# Altium footprint library PCB1.PcbLib: 53 footprints (part 2 of 4)
Each footprint in its own frame and in the unit in brackets; x right, y up, seen from the top. Pads: shape width x height; smd on the part's side, far side on the other; paste and mask are expansions set on the pad; w line width, h text height; cw(c..) or ccw(c..) is an arc to the next point about the centre after c.
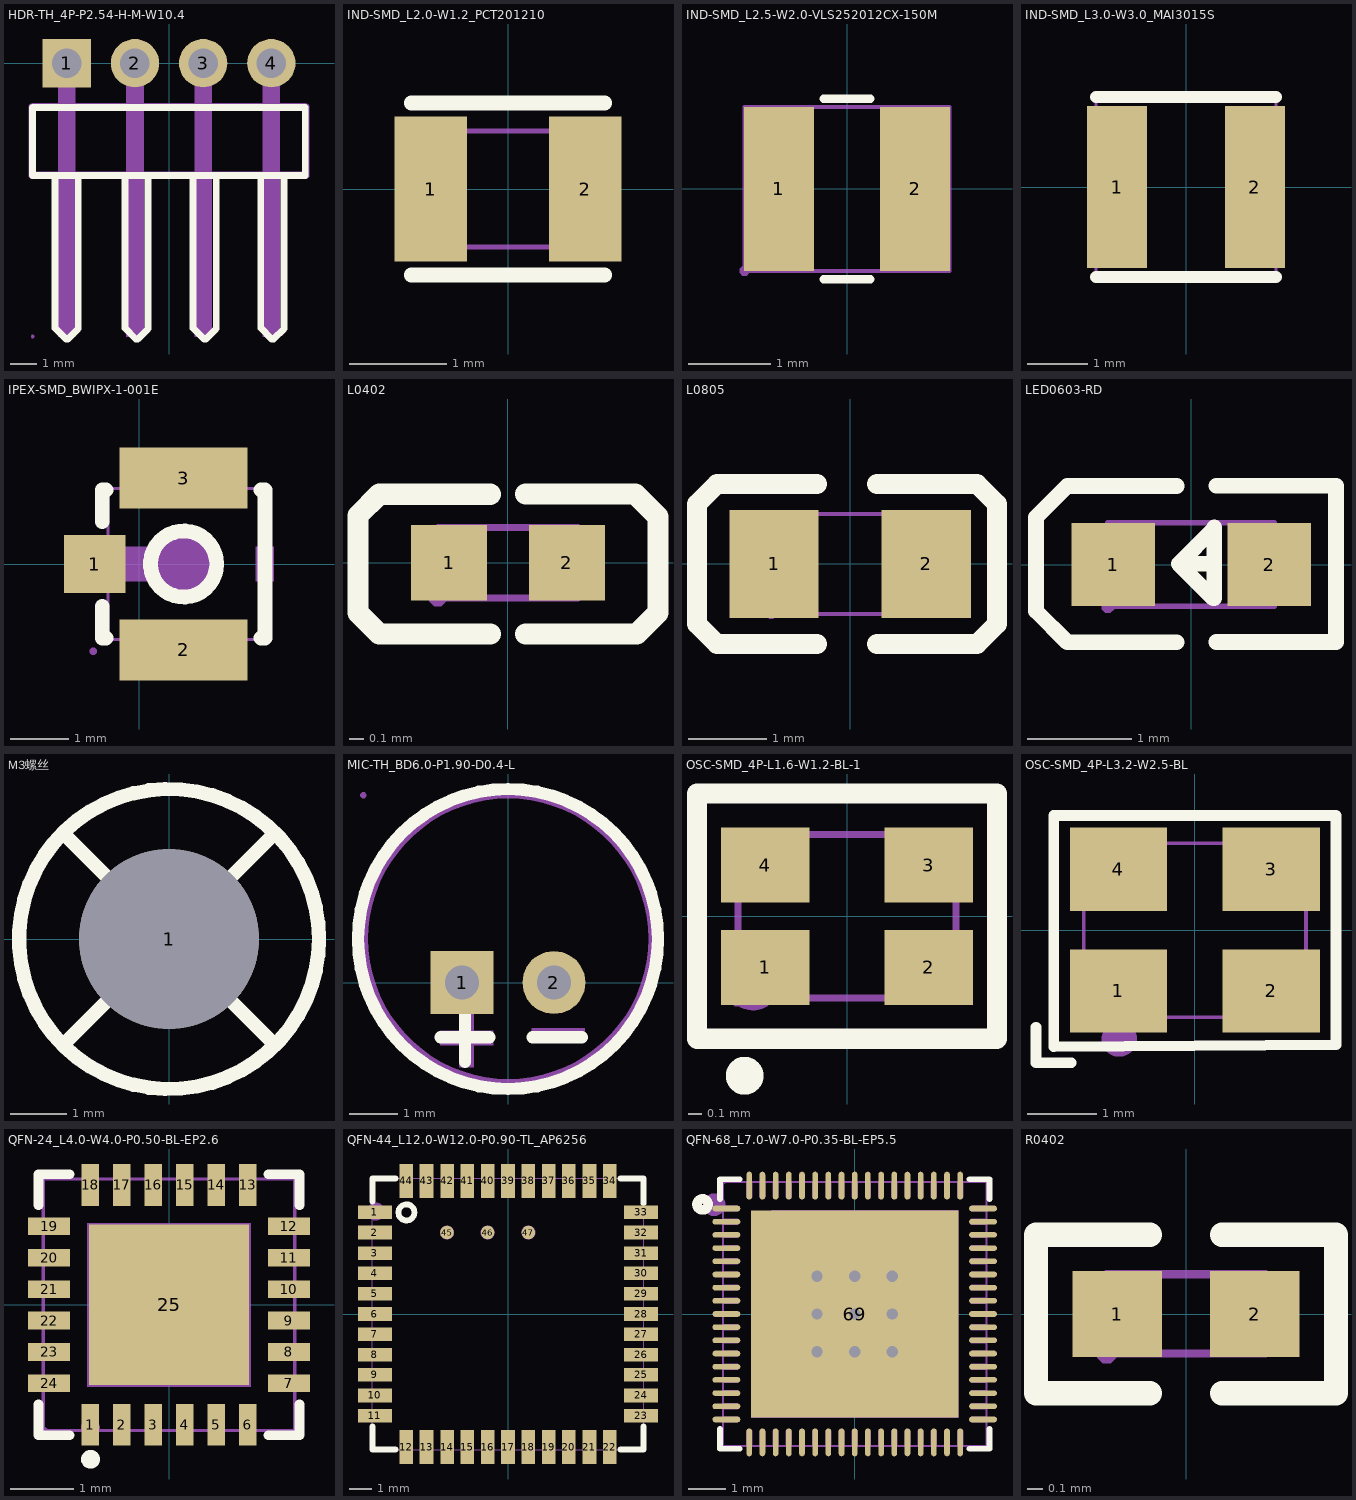
[diagram p1: the footprints below, top view; thin cyan lines are the x and y axes]

## HDR-TH_4P-P2.54-H-M-W10.4 [mm]
pads (4):
  rect 1.8x1.8 hole 1.1: 1(-3.81,0)
  round 1.8 hole 1.1: 2(-1.27,0) 3(1.27,0) 4(3.81,0)
Top Overlay:
  lines w0.254: -5.09,-1.699 -5.09,-4.181 5.07,-4.181 5.07,-1.651 -5.09,-1.651 ; -3.84,-10.273 -4.244,-9.869 ; -3.764,-10.273 -3.383,-9.892 ; -1.644,-4.273 -1.644,-9.869 -1.24,-10.273 ; -1.164,-10.273 -0.783,-9.892 -0.783,-4.273 ; 1.299,-10.273 0.895,-9.869 ; 1.375,-10.273 1.756,-9.892 ; 3.417,-4.273 3.417,-9.869 3.821,-10.273 ; 3.897,-10.273 4.278,-9.892 4.278,-4.273 ; -4.244,-9.869 -4.244,-4.273 -4.244,-9.869 ; -3.383,-9.892 -3.383,-4.273 -3.383,-9.892 ; 0.895,-9.869 0.895,-4.273 0.895,-9.869 ; 1.756,-9.892 1.756,-4.273 1.756,-9.892
Mechanical 6:
  region: 4.969,-4.177 4.969,-1.754 -5.104,-1.754 -5.152,-1.744 -5.193,-1.717 -5.221,-1.676 -5.231,-1.627 -5.221,-1.578 -5.193,-1.537 -5.152,-1.51 -5.104,-1.5 5.096,-1.5 5.145,-1.51 5.186,-1.537 5.214,-1.578 5.223,-1.627 5.223,-4.177 5.214,-4.226 5.186,-4.267 5.145,-4.294 5.096,-4.304 5.048,-4.294 5.007,-4.267 4.979,-4.226
  region: -4.973,-1.63 -4.973,-4.053 5.1,-4.053 5.149,-4.063 5.19,-4.09 5.217,-4.131 5.227,-4.18 5.217,-4.229 5.19,-4.27 5.149,-4.297 5.1,-4.307 -5.1,-4.307 -5.149,-4.297 -5.19,-4.27 -5.217,-4.229 -5.227,-4.18 -5.227,-1.63 -5.217,-1.581 -5.19,-1.54 -5.149,-1.513 -5.1,-1.503 -5.051,-1.513 -5.01,-1.54 -4.983,-1.581
Mechanical 7:
  lines w0.051: -5.08,-4.18 -5.08,-1.64 5.08,-1.64 5.08,-4.18 -5.08,-4.18
Mechanical 8:
  region: -5.02,-10.18 -5.02,-10.205 -5.055,-10.24 -5.105,-10.24 -5.14,-10.205 -5.14,-10.18 -5.14,-10.155 -5.105,-10.12 -5.055,-10.12 -5.02,-10.155 -5.02,-10.18
Mechanical 9:
  region: 3.49,0.32 4.13,0.32 4.13,-0.32 3.49,-0.32
  region: 0.95,0.32 1.59,0.32 1.59,-0.32 0.95,-0.32
  region: -1.59,0.32 -0.95,0.32 -0.95,-0.32 -1.59,-0.32
  region: -4.13,0.32 -3.49,0.32 -3.49,-0.32 -4.13,-0.32
Mechanical 10:
  region: -4.13,0.32 -4.13,-10.18 -3.49,-10.18 -3.49,0.32
  region: -1.59,0.32 -1.59,-10.18 -0.95,-10.18 -0.95,0.32
  region: 0.95,0.32 0.95,-10.18 1.59,-10.18 1.59,0.32
  region: 3.49,0.32 3.49,-10.18 4.13,-10.18 4.13,0.32
3D body "C492412.step": height 2.5, standoff -3.05, extent -5.08,-10.219 5.09,0.381

## IND-SMD_L2.0-W1.2_PCT201210 [mm]
pads (2):
  rect 0.75x1.5 smd: 1(-0.8,0) 2(0.8,0)
Top Overlay:
  lines w0.154: -1,-0.889 1,-0.889 ; -1,0.889 1,0.889
Mechanical 7:
  lines w0.051: -1,-0.6 -1,0.6 1,0.6 1,-0.6 -1,-0.6
Mechanical 8:
  region: -0.94,-0.6 -0.94,-0.625 -0.975,-0.66 -1.025,-0.66 -1.06,-0.625 -1.06,-0.6 -1.06,-0.575 -1.025,-0.54 -0.975,-0.54 -0.94,-0.575 -0.94,-0.6
Mechanical 9:
  region: 0.6,0.6 1,0.6 1,-0.6 0.6,-0.6
  region: -1,0.6 -0.6,0.6 -0.6,-0.6 -1,-0.6
3D body "C2831365.step": height 0.61, standoff 0, extent -1.003,-0.665 0.997,0.636

## IND-SMD_L2.5-W2.0-VLS252012CX-150M [mm]
pads (2):
  rect 0.85x2 smd: 1(-0.83,0) 2(0.83,0)
Top Overlay:
  lines w0.102: -0.288,-1.1 0.287,-1.1 ; -0.288,1.1 0.287,1.1
Mechanical 7:
  lines w0.051: -1.25,-1 -1.25,1 1.25,1 1.25,-1 -1.25,-1
Mechanical 8:
  region: -1.19,-1 -1.19,-1.025 -1.225,-1.06 -1.275,-1.06 -1.31,-1.025 -1.31,-1 -1.31,-0.975 -1.275,-0.94 -1.225,-0.94 -1.19,-0.975 -1.19,-1
Mechanical 9:
  region: -1.23,1 -0.43,1 -0.43,-1 -1.23,-1
  region: 0.43,1 1.23,1 1.23,-1 0.43,-1
3D body "C5832360.step": height 1.12, standoff -0.09, extent -1.251,-1.001 1.251,1.001

## IND-SMD_L3.0-W3.0_MAI3015S [mm]
pads (2):
  rect 1x2.7 smd: 1(-1.15,0) 2(1.15,0)
Top Overlay:
  lines w0.2: -1.5,-1.5 1.5,-1.5 ; -1.5,1.5 1.5,1.5
Mechanical 7:
  lines w0.051: -1.5,-1.5 1.5,-1.5 1.5,1.5 -1.5,1.5 -1.5,-1.5
Mechanical 8:
  region: -1.44,-1.5 -1.44,-1.525 -1.475,-1.56 -1.525,-1.56 -1.56,-1.525 -1.56,-1.5 -1.56,-1.475 -1.525,-1.44 -1.475,-1.44 -1.44,-1.475 -1.44,-1.5
Mechanical 9:
  region: -1.5,1.25 -0.7,1.25 -0.7,-1.25 -1.5,-1.25
  region: 0.7,1.25 1.5,1.25 1.5,-1.25 0.7,-1.25
3D body "C55381747.step": height 1.56, standoff 0, extent -1.5,-1.5 1.5,1.5

## IPEX-SMD_BWIPX-1-001E [mm]
pads (3):
  rect 1.05x1 smd: 1(-0.763,0)
  rect 2.2x1.05 smd: 2(0.763,-1.475) 3(0.763,1.475)
Top Overlay:
  circle w0.254: c0.763,0 r0.568
  lines w0.254: -0.635,-0.731 -0.635,-1.27 -0.569,-1.27 ; -0.635,0.731 -0.635,1.27 -0.569,1.27 ; 2.094,-1.27 2.16,-1.27 2.16,-0.731 2.16,0.731 2.16,1.27 2.094,1.27
Mechanical 6:
  circle w0.2: c-1.015,0 r0.1
  region: 1.293,0 1.284,-0.099 1.255,-0.194 1.208,-0.282 1.145,-0.359 1.068,-0.422 0.98,-0.469 0.884,-0.498 0.785,-0.508 0.693,-0.498 0.603,-0.47 0.521,-0.427 0.447,-0.37 0.385,-0.3 -0.45,-0.3 -0.45,0.3 0.385,0.3 0.447,0.37 0.521,0.427 0.603,0.47 0.693,0.498 0.785,0.508 0.884,0.498 0.98,0.469 1.068,0.422 1.145,0.359 1.208,0.282 1.255,0.194 1.284,0.099
Mechanical 7:
  lines w0.051: -0.537,-1.3 -0.537,1.3 2.063,1.3 2.063,-1.3 -0.537,-1.3
Mechanical 8:
  region: -0.727,-1.5 -0.727,-1.525 -0.763,-1.56 -0.812,-1.56 -0.847,-1.525 -0.847,-1.5 -0.847,-1.475 -0.812,-1.44 -0.763,-1.44 -0.727,-1.475 -0.727,-1.5
Mechanical 9:
  region: -0.437,0.3 -0.437,-0.3 -0.787,-0.3 -0.787,0.3
  region: 1.663,-1.5 -0.137,-1.5 -0.137,-1.1 1.663,-1.1
  region: 1.663,1.1 -0.137,1.1 -0.137,1.5 1.663,1.5
Mechanical 10:
  region: 1.293,0 1.284,-0.099 1.255,-0.194 1.208,-0.282 1.145,-0.359 1.068,-0.422 0.98,-0.469 0.884,-0.498 0.785,-0.508 0.693,-0.498 0.603,-0.47 0.521,-0.427 0.447,-0.37 0.385,-0.3 -0.45,-0.3 -0.45,0.3 0.385,0.3 0.447,0.37 0.521,0.427 0.603,0.47 0.693,0.498 0.785,0.508 0.884,0.498 0.98,0.469 1.068,0.422 1.145,0.359 1.208,0.282 1.255,0.194 1.284,0.099
  region: 2,0.3 2.312,0.3 2.312,-0.3 2,-0.3
3D body "C496552.step": height 1.25, standoff -0.01, extent -0.788,-1.5 2.312,1.5

## L0402 [mm]
pads (2):
  rect 0.54x0.54 smd: 1(-0.42,0) 2(0.42,0)
Top Overlay:
  lines w0.152: -0.127,-0.508 -0.917,-0.508 -1.069,-0.356 -1.069,0.337 -0.917,0.489 -0.127,0.489 ; 0.127,-0.508 0.917,-0.508 1.069,-0.356 1.069,0.328 0.907,0.49 0.127,0.49
Mechanical 7:
  lines w0.051: -0.5,-0.25 0.5,-0.25 0.5,0.25 -0.5,0.25 -0.5,-0.25
Mechanical 8:
  region: -0.44,-0.25 -0.44,-0.275 -0.475,-0.31 -0.525,-0.31 -0.56,-0.275 -0.56,-0.25 -0.56,-0.225 -0.525,-0.19 -0.475,-0.19 -0.44,-0.225 -0.44,-0.25
Mechanical 9:
  region: 0.5,-0.25 0.5,0.25 0.25,0.25 0.25,-0.25
  region: -0.5,-0.25 -0.5,0.25 -0.25,0.25 -0.25,-0.25
3D body "C76891.step": height 0.25, standoff -0.25, extent -0.5,-0.25 0.5,0.25

## L0805 [mm]
pads (2):
  rect 1.133x1.377 smd paste-100 mask+0.051: 1(-0.966,0) 2(0.966,0)
Top Overlay:
  lines w0.254: -0.421,-1.016 -1.691,-1.016 -1.945,-0.762 -1.945,-0.635 -1.945,0.762 -1.691,1.016 -1.564,1.016 -0.421,1.016 ; 0.341,-1.016 1.484,-1.016 1.611,-1.016 1.865,-0.762 1.865,0.635 1.865,0.762 1.611,1.016 0.341,1.016
Top Paste:
  region: -0.36,-0.22 -0.36,0.22 -0.745,0.689 -1.433,0.689 -1.533,0.589 -1.533,-0.588 -1.433,-0.688 -0.745,-0.688
  region: 0.36,-0.22 0.36,0.22 0.745,0.689 1.433,0.689 1.533,0.589 1.533,-0.588 1.433,-0.688 0.745,-0.688
Mechanical 7:
  lines w0.051: -1,-0.637 -1,0.638 1,0.638 1,-0.637 -1,-0.637
Mechanical 8:
  region: -0.94,-0.637 -0.94,-0.662 -0.975,-0.697 -1.025,-0.697 -1.06,-0.662 -1.06,-0.637 -1.06,-0.613 -1.025,-0.577 -0.975,-0.577 -0.94,-0.613 -0.94,-0.637
Mechanical 9:
  region: 1,-0.637 1,0.638 0.6,0.638 0.6,-0.637
  region: -1,-0.637 -1,0.638 -0.6,0.638 -0.6,-0.637
3D body "C63166.step": height 0.61, standoff 0, extent -1,-0.651 1,0.65

## LED0603-RD [mm]
pads (2):
  rect 0.8x0.8 smd: 1(-0.749,0) 2(0.749,0)
Top Overlay:
  lines w0.15: -0.14,-0.746 -1.19,-0.746 -1.49,-0.446 -1.49,-0.346 -1.49,0.354 -1.49,0.454 -1.19,0.754 -0.14,0.754 ; 0.22,0.007 -0.12,0.007 ; 0.24,-0.744 1.39,-0.744 ; 0.24,0.757 1.39,0.757 1.39,-0.723 ; -0.12,0.007 0.21,-0.324 0.22,-0.324 0.22,0.357 0.22,0.347 -0.12,0.007
Mechanical 6:
  region: -1.07,0.062 -0.53,0.062 -0.53,-0.068 -1.07,-0.068
  region: 0.735,-0.267 0.735,0.273 0.865,0.273 0.865,-0.267
  region: 0.529,0.068 1.069,0.068 1.069,-0.062 0.529,-0.062
Mechanical 7:
  lines w0.051: -0.8,-0.4 -0.8,0.4 0.8,0.4 0.8,-0.4 -0.8,-0.4
Mechanical 8:
  region: -0.739,-0.403 -0.739,-0.428 -0.775,-0.463 -0.824,-0.463 -0.859,-0.428 -0.859,-0.403 -0.859,-0.379 -0.824,-0.344 -0.775,-0.344 -0.739,-0.379 -0.739,-0.403
Mechanical 9:
  region: -0.8,-0.403 -0.8,0.397 -0.5,0.397 -0.5,-0.403
  region: 0.5,-0.396 0.5,0.404 0.8,0.404 0.8,-0.396
3D body "C51933293.step": height 0.55, standoff -0.01, extent -0.81,-0.41 0.81,0.41

## M3螺丝 [mil]
pads (1):
  round 126 hole 126 paste-99999 mask+4: 1(0,0)
Top Overlay:
  circle w10: c0,0 r105
  lines w10: -72.5,-72.5 72.5,72.5 ; -72.5,72.5 72.5,-72.5

## MIC-TH_BD6.0-P1.90-D0.4-L [mm]
pads (2):
  rect 1.3x1.3 hole 0.7: 1(-0.95,0)
  round 1.3 hole 0.7: 2(0.95,0)
Top Overlay:
  circle w0.254: c0,0.9 r3.1
  lines w0.254: -1.397,-1.132 -0.381,-1.132 ; -0.889,-1.64 -0.889,-0.624 ; 0.508,-1.132 1.524,-1.132
Mechanical 6:
  drawing of 7 lines, arcs and shapes, not listed
Mechanical 7:
  lines w0.051: -2.99,0.82 ccw(c-0.165,0.82) -2.163,-1.177 -2.105,-1.235 -1.9,-1.425 -1.645,-1.605 -1.415,-1.745 -1.145,-1.87 -0.87,-1.97 -0.59,-2.04 -0.29,-2.09 0.29,-2.09 0.865,-1.975 1.4,-1.75 1.95,-1.4 2.187,-1.163 ccw(c0.224,0.8) 3,0.8 3,1.019 ccw(c0.269,1.019) 2.2,2.95 2.134,3.016 ccw(c0,0.882) 0,3.9 -0.29,3.89 -0.89,3.77 -1.15,3.67 -1.42,3.545 -1.63,3.415 -1.92,3.205 -2.27,2.855 -2.485,2.575 -2.65,2.31 -2.775,2.04 -2.875,1.755 -2.99,1.2 -2.99,0.82
Mechanical 8:
  region: -2.93,3.87 -2.93,3.845 -2.965,3.81 -3.015,3.81 -3.05,3.845 -3.05,3.87 -3.05,3.895 -3.015,3.93 -2.965,3.93 -2.93,3.895 -2.93,3.87
Mechanical 9:
  region: -0.7,0 -0.7,-0.05 -0.738,-0.142 -0.808,-0.212 -0.9,-0.25 -1,-0.25 -1.092,-0.212 -1.162,-0.142 -1.2,-0.05 -1.2,0 -1.2,0.05 -1.162,0.142 -1.092,0.212 -1,0.25 -0.9,0.25 -0.808,0.212 -0.738,0.142 -0.7,0.05 -0.7,0
  region: 1.2,0 1.2,-0.05 1.162,-0.142 1.092,-0.212 1,-0.25 0.9,-0.25 0.808,-0.212 0.738,-0.142 0.7,-0.05 0.7,0 0.7,0.05 0.738,0.142 0.808,0.212 0.9,0.25 1,0.25 1.092,0.212 1.162,0.142 1.2,0.05 1.2,0
3D body "C233905.step": height 2.85, standoff -2.8, extent -3,-2.111 3,3.899

## OSC-SMD_4P-L1.6-W1.2-BL-1 [mm]
pads (4):
  rect 0.65x0.55 smd: 1(-0.6,-0.375) 2(0.6,-0.375) 3(0.6,0.375) 4(-0.6,0.375)
Top Overlay:
  circle w0.15: c-0.75,-1.17 r0.064
  lines w0.15: -1.1,-0.9 1.1,-0.9 1.1,0.9 -1.1,0.9 -1.1,-0.9
Mechanical 6:
  circle w0.2: c-0.69,-0.49 r0.1
Mechanical 7:
  lines w0.051: -0.8,-0.6 -0.8,0.6 0.8,0.6 0.8,-0.6 -0.8,-0.6
Mechanical 8:
  region: -0.74,-0.6 -0.74,-0.625 -0.775,-0.66 -0.825,-0.66 -0.86,-0.625 -0.86,-0.6 -0.86,-0.575 -0.825,-0.54 -0.775,-0.54 -0.74,-0.575 -0.74,-0.6
Mechanical 9:
  region: -0.787,-0.2 -0.412,-0.2 -0.412,-0.55 -0.787,-0.55
  region: -0.75,0.2 -0.75,0.55 -0.45,0.55 -0.45,0.2
  region: 0.45,0.2 0.45,0.55 0.75,0.55 0.75,0.2
  region: 0.45,-0.55 0.45,-0.2 0.75,-0.2 0.75,-0.55
3D body "C20623632.step": height 0.8, standoff -0.01, extent -0.8,-0.6 0.8,0.6

## OSC-SMD_4P-L3.2-W2.5-BL [mm]
pads (4):
  rect 1.4x1.2 smd: 1(-1.1,-0.875) 2(1.1,-0.875) 3(1.1,0.875) 4(-1.1,0.875)
Top Overlay:
  lines w0.152: -2.286,-1.397 -2.286,-1.905 -1.778,-1.905 ; -2.029,-1.679 -2.029,1.651 2.032,1.651 2.032,0 2.032,-1.651 -2.029,-1.679
Mechanical 6:
  circle w0.254: c-1.088,-1.567 r0.127
  region: -1.486,-0.428 -1.45,-0.428 -1.45,-1.004 -1.486,-1.004
  region: -1.522,-0.428 -1.486,-0.428 -1.486,-1.004 -1.522,-1.004
  region: -1.558,-0.428 -1.522,-0.428 -1.522,-1.004 -1.558,-1.004
  region: -1.594,-0.464 -1.558,-0.464 -1.558,-1.004 -1.594,-1.004
  region: -1.63,-0.464 -1.594,-0.464 -1.594,-0.572 -1.63,-0.572
  region: -1.666,-0.5 -1.63,-0.5 -1.63,-0.608 -1.666,-0.608
  region: -1.702,-0.536 -1.666,-0.536 -1.666,-0.608 -1.702,-0.608
  region: -1.738,-0.536 -1.702,-0.536 -1.702,-0.608 -1.738,-0.608
Mechanical 7:
  lines w0.051: -1.6,-1.25 -1.6,1.25 1.6,1.25 1.6,-1.25 -1.6,-1.25
Mechanical 8:
  region: -1.54,-1.25 -1.54,-1.275 -1.575,-1.31 -1.625,-1.31 -1.66,-1.275 -1.66,-1.25 -1.66,-1.225 -1.625,-1.19 -1.575,-1.19 -1.54,-1.225 -1.54,-1.25
Mechanical 9:
  region: 0.6,1.249 1.5,1.249 1.5,0.449 0.6,0.449
  region: -1.5,1.249 -0.6,1.249 -0.6,0.449 -1.5,0.449
  region: -1.5,-0.449 -0.6,-0.449 -0.6,-1.249 -1.5,-1.249
  region: 0.6,-0.449 1.5,-0.449 1.5,-1.249 0.6,-1.249
3D body "C5444545.step": height 0.7, standoff 0, extent -1.6,-1.25 1.6,1.25

## QFN-24_L4.0-W4.0-P0.50-BL-EP2.6 [mm]
pads (25):
  rect 0.28x0.665 smd paste-100 mask+0.05: 1(-1.25,-1.908) 2(-0.75,-1.908) 3(-0.25,-1.908) 4(0.25,-1.908) 5(0.75,-1.908) 6(1.25,-1.908) 13(1.25,1.908) 14(0.75,1.908) 15(0.25,1.908) 16(-0.25,1.908) 17(-0.75,1.908) 18(-1.25,1.908)
  rect 0.665x0.28 smd paste-100 mask+0.05: 7(1.908,-1.25) 8(1.908,-0.75) 9(1.908,-0.25) 10(1.908,0.25) 11(1.908,0.75) 12(1.908,1.25) 19(-1.908,1.25) 20(-1.908,0.75) 21(-1.908,0.25) 22(-1.908,-0.25) 23(-1.908,-0.75) 24(-1.908,-1.25)
  rect 2.55x2.55 smd paste-100 mask+0.05: 25(0,0)
Top Overlay:
  circle w0.15: c-1.25,-2.458 r0.075
  lines w0.152: -2.076,-1.58 -2.076,-2.076 -1.58,-2.076 ; -2.076,1.58 -2.076,2.076 -1.58,2.076 ; 1.58,-2.076 2.076,-2.076 2.076,-1.58 ; 1.58,2.076 2.076,2.076 2.076,1.58
Top Paste:
  region: -1.575,-1.39 -1.575,-1.11 -2.24,-1.11 -2.24,-1.39
  region: -1.575,-0.89 -1.575,-0.61 -2.24,-0.61 -2.24,-0.89
  region: -1.575,-0.39 -1.575,-0.11 -2.24,-0.11 -2.24,-0.39
  region: -1.575,0.11 -1.575,0.39 -2.24,0.39 -2.24,0.11
  region: -1.575,0.61 -1.575,0.89 -2.24,0.89 -2.24,0.61
  region: -1.575,1.11 -1.575,1.39 -2.24,1.39 -2.24,1.11
  region: -1.39,2.24 -1.39,1.575 -1.11,1.575 -1.11,2.24
  region: -0.89,2.24 -0.89,1.575 -0.61,1.575 -0.61,2.24
  region: -0.39,2.24 -0.39,1.575 -0.11,1.575 -0.11,2.24
  region: 0.11,2.24 0.11,1.575 0.39,1.575 0.39,2.24
  region: 0.61,2.24 0.61,1.575 0.89,1.575 0.89,2.24
  region: 1.11,2.24 1.11,1.575 1.39,1.575 1.39,2.24
  region: 2.24,1.11 2.24,1.39 1.575,1.39 1.575,1.11
  region: 2.24,0.61 2.24,0.89 1.575,0.89 1.575,0.61
  region: 2.24,0.11 2.24,0.39 1.575,0.39 1.575,0.11
  region: 2.24,-0.39 2.24,-0.11 1.575,-0.11 1.575,-0.39
  region: 2.24,-0.89 2.24,-0.61 1.575,-0.61 1.575,-0.89
  region: 2.24,-1.39 2.24,-1.11 1.575,-1.11 1.575,-1.39
  region: 1.11,-2.24 1.11,-1.575 1.39,-1.575 1.39,-2.24
  region: 0.61,-2.24 0.61,-1.575 0.89,-1.575 0.89,-2.24
  region: 0.11,-2.24 0.11,-1.575 0.39,-1.575 0.39,-2.24
  region: -0.39,-2.24 -0.39,-1.575 -0.11,-1.575 -0.11,-2.24
  region: -0.89,-2.24 -0.89,-1.575 -0.61,-1.575 -0.61,-2.24
  region: -1.39,-2.24 -1.39,-1.575 -1.11,-1.575 -1.11,-2.24
  region: -1.02,1.02 1.02,1.02 1.02,-1.02 -1.02,-1.02
Mechanical 6:
  circle w0.15: c-1.25,-1.958 r0.075
Mechanical 7:
  lines w0.051: -2,-2 -2,2 2,2 2,-2 -2,-2
Mechanical 8:
  region: -1.94,-2 -1.94,-2.025 -1.975,-2.06 -2.025,-2.06 -2.06,-2.025 -2.06,-2 -2.06,-1.975 -2.025,-1.94 -1.975,-1.94 -1.94,-1.975 -1.94,-2
Mechanical 9:
  region: -1.37,-2 -1.37,-1.6 -1.13,-1.6 -1.13,-2
  region: -0.87,-2 -0.87,-1.6 -0.63,-1.6 -0.63,-2
  region: -0.37,-2 -0.37,-1.6 -0.13,-1.6 -0.13,-2
  region: 0.13,-2 0.13,-1.6 0.37,-1.6 0.37,-2
  region: 0.63,-2 0.63,-1.6 0.87,-1.6 0.87,-2
  region: 1.13,-2 1.13,-1.6 1.37,-1.6 1.37,-2
  region: 1.6,-1.37 1.6,-1.13 2,-1.13 2,-1.37
  region: 1.6,-0.87 1.6,-0.63 2,-0.63 2,-0.87
  region: 1.6,-0.37 1.6,-0.13 2,-0.13 2,-0.37
  region: 1.6,0.13 1.6,0.37 2,0.37 2,0.13
  region: 1.6,0.63 1.6,0.87 2,0.87 2,0.63
  region: 1.6,1.13 1.6,1.37 2,1.37 2,1.13
  region: 1.13,2 1.13,1.6 1.37,1.6 1.37,2
  region: 0.63,2 0.63,1.6 0.87,1.6 0.87,2
  region: 0.13,2 0.13,1.6 0.37,1.6 0.37,2
  region: -0.37,2 -0.37,1.6 -0.13,1.6 -0.13,2
  region: -0.87,2 -0.87,1.6 -0.63,1.6 -0.63,2
  region: -1.37,2 -1.37,1.6 -1.13,1.6 -1.13,2
  region: -1.6,1.13 -1.6,1.37 -2,1.37 -2,1.13
  region: -1.6,0.63 -1.6,0.87 -2,0.87 -2,0.63
  region: -1.6,0.13 -1.6,0.37 -2,0.37 -2,0.13
  region: -1.6,-0.37 -1.6,-0.13 -2,-0.13 -2,-0.37
  region: -1.6,-0.87 -1.6,-0.63 -2,-0.63 -2,-0.87
  region: -1.6,-1.37 -1.6,-1.13 -2,-1.13 -2,-1.37
  region: -1.3,1.3 1.3,1.3 1.3,-1.3 -1.3,-1.3
3D body "C511283.step": height 0.91, standoff 0, extent -2,-2 2,2

## QFN-44_L12.0-W12.0-P0.90-TL_AP6256 [mm]
pads (47):
  rect 1.5x0.6 smd paste+0 mask+0.05: 1(-5.889,4.496) 2(-5.889,3.607) 3(-5.889,2.692) 4(-5.889,1.803) 5(-5.889,0.889) 6(-5.889,0) 7(-5.889,-0.889) 8(-5.889,-1.803) 9(-5.889,-2.692) 10(-5.889,-3.607) 11(-5.889,-4.496) 23(5.889,-4.496) 24(5.889,-3.607) 25(5.889,-2.692) 26(5.889,-1.803) 27(5.889,-0.889) 28(5.889,0) 29(5.889,0.889) 30(5.889,1.803) 31(5.889,2.692) 32(5.889,3.607) 33(5.889,4.496)
  rect 0.6x1.5 smd paste+0 mask+0.05: 12(-4.496,-5.889) 13(-3.607,-5.889) 14(-2.692,-5.889) 15(-1.803,-5.889) 16(-0.889,-5.889) 17(0,-5.889) 18(0.889,-5.889) 19(1.803,-5.889) 20(2.692,-5.889) 21(3.607,-5.889) 22(4.496,-5.889) 34(4.496,5.889) 35(3.607,5.889) 36(2.692,5.889) 37(1.803,5.889) 38(0.889,5.889) 39(0,5.889) 40(-0.889,5.889) 41(-1.803,5.889) 42(-2.692,5.889) 43(-3.607,5.889) 44(-4.496,5.889)
  round 0.6 smd paste+0 mask+0.05: 45(-2.7,3.607) 46(-0.9,3.607) 47(0.9,3.607)
Top Overlay:
  circle w0.254: c-4.496,4.496 r0.356
  lines w0.254: -5.994,-4.978 -5.994,-5.994 -4.978,-5.994 ; -5.994,4.978 -5.994,5.994 -4.978,5.994 ; 4.978,-5.994 5.994,-5.994 5.994,-4.978 ; 4.978,5.994 5.994,5.994 5.994,4.902
Mechanical 6:
  circle w0.4: c-5.86,4.536 r0.2
Mechanical 7:
  lines w0.051: -6,-6 6,-6 6,6 -6,6 -6,-6
Mechanical 8:
  region: -5.94,6 -5.94,5.975 -5.975,5.94 -6.025,5.94 -6.06,5.975 -6.06,6 -6.06,6.025 -6.025,6.06 -5.975,6.06 -5.94,6.025 -5.94,6
Mechanical 9:
  drawing of 47 lines, arcs and shapes, not listed
3D body "C5248079.step": height 1.5, standoff -0.01, extent -6.01,-6.01 6.01,6.01

## QFN-68_L7.0-W7.0-P0.35-BL-EP5.5 [mm]
pads (69):
  oval 0.74x0.15 smd paste-100 mask+0.051: 1(-3.407,2.8) 2(-3.407,2.45) 3(-3.407,2.1) 4(-3.407,1.75) 5(-3.407,1.4) 6(-3.407,1.05) 7(-3.407,0.7) 8(-3.407,0.35) 9(-3.407,0) 10(-3.407,-0.35) 11(-3.407,-0.7) 12(-3.407,-1.05) 13(-3.407,-1.4) 14(-3.407,-1.75) 15(-3.407,-2.1) 16(-3.407,-2.45) 17(-3.407,-2.8) 35(3.407,-2.8) 36(3.407,-2.45) 37(3.407,-2.1) 38(3.407,-1.75) 39(3.407,-1.4) 40(3.407,-1.05) 41(3.407,-0.7) 42(3.407,-0.35) 43(3.407,0) 44(3.407,0.35) 45(3.407,0.7) 46(3.407,1.05) 47(3.407,1.4) 48(3.407,1.75) 49(3.407,2.1) 50(3.407,2.45) 51(3.407,2.8)
  oval 0.15x0.74 smd paste-100 mask+0.051: 18(-2.8,-3.407) 19(-2.45,-3.407) 20(-2.1,-3.407) 21(-1.75,-3.407) 22(-1.4,-3.407) 23(-1.05,-3.407) 24(-0.7,-3.407) 25(-0.35,-3.407) 26(0,-3.407) 27(0.35,-3.407) 28(0.7,-3.407) 29(1.05,-3.407) 30(1.4,-3.407) 31(1.75,-3.407) 32(2.1,-3.407) 33(2.45,-3.407) 34(2.8,-3.407) 52(2.8,3.407) 53(2.45,3.407) 54(2.1,3.407) 55(1.75,3.407) 56(1.4,3.407) 57(1.05,3.407) 58(0.7,3.407) 59(0.35,3.407) 60(0,3.407) 61(-0.35,3.407) 62(-0.7,3.407) 63(-1.05,3.407) 64(-1.4,3.407) 65(-1.75,3.407) 66(-2.1,3.407) 67(-2.45,3.407) 68(-2.8,3.407)
  rect 5.5x5.5 smd paste-100 mask+0.051: 69(0,0)
via -1,1 diameter 0.6 hole 0.3
via 0,1 diameter 0.6 hole 0.3
via 1,1 diameter 0.6 hole 0.3
via -1,0 diameter 0.6 hole 0.3
via 0,0 diameter 0.6 hole 0.3
via 1,0 diameter 0.6 hole 0.3
via -1,-1 diameter 0.6 hole 0.3
via 0,-1 diameter 0.6 hole 0.3
via 1,-1 diameter 0.6 hole 0.3
Top Overlay:
  circle w0.254: c-4.04,2.91 r0.148
  lines w0.152: -3.576,-3.05 -3.576,-3.576 -3.05,-3.576 ; -3.576,3.05 -3.576,3.576 -3.05,3.576 ; 3.05,-3.576 3.576,-3.576 3.576,-3.05 ; 3.05,3.576 3.576,3.576 3.576,3.05
Top Paste:
  drawing of 69 lines, arcs and shapes, not listed
Mechanical 6:
  circle w0.3: c-3.73,2.9 r0.15
Mechanical 7:
  lines w0.051: -3.5,-3.5 3.5,-3.5 3.5,3.5 -3.5,3.5 -3.5,-3.5
Mechanical 8:
  region: -3.44,3.5 -3.44,3.475 -3.475,3.44 -3.525,3.44 -3.56,3.475 -3.56,3.5 -3.56,3.525 -3.525,3.56 -3.475,3.56 -3.44,3.525 -3.44,3.5
Mechanical 9:
  drawing of 69 lines, arcs and shapes, not listed
3D body "C2939628.step": height 0.75, standoff 0, extent -3.5,-3.5 3.5,3.5

## R0402 [mm]
pads (2):
  rect 0.566x0.54 smd paste-100 mask+0.051: 1(-0.433,0) 2(0.433,0)
Top Overlay:
  lines w0.152: -0.226,-0.499 -0.944,-0.499 -0.944,0.499 -0.226,0.499 ; 0.226,-0.499 0.944,-0.499 0.944,0.499 0.226,0.499
Top Paste:
  region: 0.135,-0.23 0.135,0.23 0.175,0.27 0.676,0.27 0.716,0.23 0.716,-0.23 0.676,-0.27 0.175,-0.27
  region: -0.135,-0.23 -0.135,0.23 -0.175,0.27 -0.676,0.27 -0.716,0.23 -0.716,-0.23 -0.676,-0.27 -0.175,-0.27
Mechanical 7:
  lines w0.051: -0.5,-0.25 -0.5,0.25 0.5,0.25 0.5,-0.25 -0.5,-0.25
Mechanical 8:
  region: -0.44,-0.25 -0.44,-0.275 -0.475,-0.31 -0.525,-0.31 -0.56,-0.275 -0.56,-0.25 -0.56,-0.225 -0.525,-0.19 -0.475,-0.19 -0.44,-0.225 -0.44,-0.25
Mechanical 9:
  region: 0.251,-0.25 0.251,0.25 0.501,0.25 0.501,-0.25
  region: -0.249,0.25 -0.249,-0.25 -0.499,-0.25 -0.499,0.25
3D body "C2906860.step": height 0.36, standoff 0, extent -0.5,-0.25 0.5,0.251